# Altium footprint library SYNCBOX_TST.PcbLib: 267 footprints (part 9 of 17)
Each footprint in its own frame and in the unit in brackets; x right, y up, seen from the top. Pads: shape width x height; smd on the part's side, far side on the other; paste and mask are expansions set on the pad; w line width, h text height; cw(c..) or ccw(c..) is an arc to the next point about the centre after c.
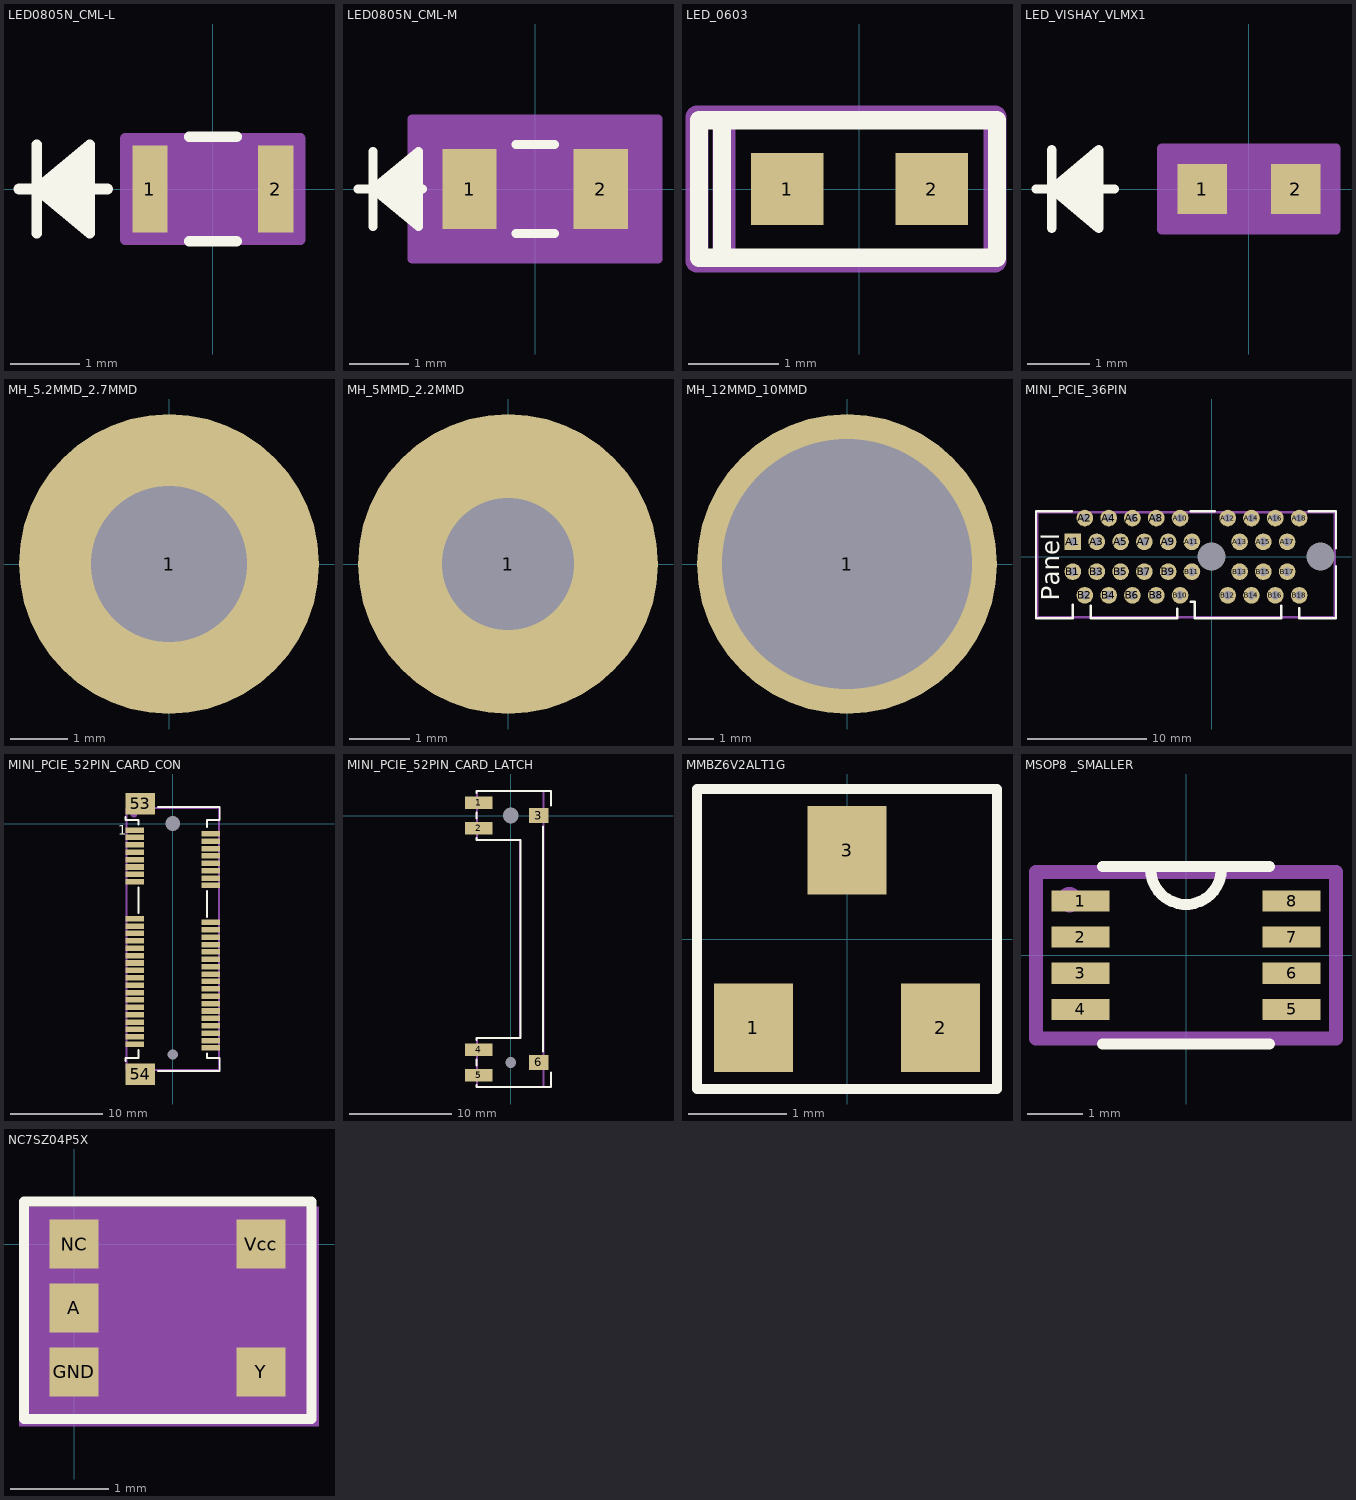
[diagram p8: the footprints below, top view; thin cyan lines are the x and y axes]

## LED0805N_CML-L [mil]
pads (2):
  rect 20x49 smd paste+0 mask+0: 1(-35.5,0) 2(35.5,0)
Top Overlay:
  lines w6: -109.5,0 -59.5,0 ; -99.5,-25 -99.5,25 ; -69.5,-20 -99.5,0 ; -69.5,-15 -99.5,0 ; -69.5,-10 -99.5,0 ; -69.5,-5 -99.5,0 ; -69.5,5 -99.5,0 ; -69.5,10 -99.5,0 ; -69.5,15 -99.5,0 ; -69.5,20 -99.5,0 ; -13.39,-29.5 13.39,-29.5 ; -13.39,29.5 13.39,29.5 ; -99.5,0 -69.5,-25 -69.5,25 -99.5,0
Mechanical 13:
  lines w1: -109.5,0 -59.5,0 ; -99.5,-25 -99.5,25 ; -69.5,-20 -99.5,0 ; -69.5,-15 -99.5,0 ; -69.5,-10 -99.5,0 ; -69.5,-5 -99.5,0 ; -69.5,5 -99.5,0 ; -69.5,10 -99.5,0 ; -69.5,15 -99.5,0 ; -69.5,20 -99.5,0 ; -99.5,0 -69.5,-25 -69.5,25 -99.5,0 ; -39.5,-24.5 -39.5,24.5 ; -39.5,-24.5 39.5,-24.5 ; -39.5,-24.5 -25.5,-24.5 -25.5,24.5 -39.5,24.5 ; -39.5,-24.5 -39.5,24.5 ; -39.5,24.5 39.5,24.5 ; 39.5,-24.5 39.5,24.5 ; 39.5,-24.5 39.5,24.5 ; 39.5,-24.5 25.5,-24.5 25.5,24.5 39.5,24.5
Mechanical 15:
  region: 49.5,-28.5 -49.5,-28.5 -49.5,28.5 49.5,28.5
  lines w6: -49.5,-28.5 49.5,-28.5 49.5,28.5 -49.5,28.5 -49.5,-28.5
3D body "LED0805N_CML-L.step": height 30.98, standoff 0, extent -39.48,-24.49 39.49,24.49
3D body: height 10, standoff 0, extent 0,0 10,10

## LED0805N_CML-M [mil]
pads (2):
  rect 36x53 smd paste+0 mask+0: 1(-43.5,0) 2(43.5,0)
Top Overlay:
  lines w6: -117.5,0 -74.6,0 ; -107.5,-25 -107.5,25 ; -77.5,-20 -107.5,0 ; -77.5,-15 -107.5,0 ; -77.5,-10 -107.5,0 ; -77.5,-5 -107.5,0 ; -77.5,5 -107.5,0 ; -77.5,10 -107.5,0 ; -77.5,15 -107.5,0 ; -77.5,20 -107.5,0 ; -12.75,-29.5 12.75,-29.5 ; -12.75,29.5 12.75,29.5 ; -107.5,0 -77.5,25 -77.5,-25 -107.5,0
Mechanical 13:
  lines w1: -117.5,0 -67.5,0 ; -107.5,-25 -107.5,25 ; -77.5,-20 -107.5,0 ; -77.5,-15 -107.5,0 ; -77.5,-10 -107.5,0 ; -77.5,-5 -107.5,0 ; -77.5,5 -107.5,0 ; -77.5,10 -107.5,0 ; -77.5,15 -107.5,0 ; -77.5,20 -107.5,0 ; -107.5,0 -77.5,25 -77.5,-25 -107.5,0 ; -39.5,-24.5 -39.5,24.5 ; -39.5,-24.5 -25.5,-24.5 -25.5,24.5 -39.5,24.5 ; -39.5,-24.5 39.5,-24.5 ; -39.5,-24.5 -39.5,24.5 ; -39.5,24.5 39.5,24.5 ; 39.5,-24.5 25.5,-24.5 25.5,24.5 39.5,24.5 ; 39.5,-24.5 39.5,24.5 ; 39.5,-24.5 39.5,24.5
Mechanical 15:
  region: 81.5,-46.5 -81.5,-46.5 -81.5,46.5 81.5,46.5
  lines w6: -81.5,-46.5 -81.5,46.5 81.5,46.5 81.5,-46.5 -81.5,-46.5
3D body "LED0805N_CML-M.step": height 30.98, standoff 0, extent -39.48,-24.49 39.49,24.49
3D body: height 10, standoff 0, extent 0,0 10,10

## LED_0603 [mm]
pads (2):
  rect 0.8x0.8 smd: 1(-0.8,0) 2(0.8,0)
Top Overlay:
  lines w0.2: -1.524,-0.762 -1.524,0.762 ; -1.778,-0.762 1.524,-0.762 1.524,0.762 -1.778,0.762 -1.778,-0.762
Mechanical 16:
  lines w0.254: -1.5,-0.8 -1.5,0.8 ; -1.8,-0.8 -1.8,0.8 1.5,0.8 1.5,-0.8 -1.8,-0.8
Mechanical 29:
  text ".Designator" at 0.4,0.3 h0.6
3D body "LED SMD 0603.step": height 0.65, standoff 0, extent -0.85,-0.4 0.85,0.4
3D body: height 0.66, standoff 0.5, extent -0.2,-0.2 0.2,0.2

## LED_VISHAY_VLMX1 [mil]
pads (2):
  rect 31.5x32 smd paste+0 mask+0: 1(-29.75,0) 2(29.75,0)
Top Overlay:
  lines w6: -135.5,0 -85.5,0 ; -125.5,-25 -125.5,25 ; -95.5,-20 -125.5,0 ; -95.5,-15 -125.5,0 ; -95.5,-10 -125.5,0 ; -95.5,-5 -125.5,0 ; -95.5,5 -125.5,0 ; -95.5,10 -125.5,0 ; -95.5,15 -125.5,0 ; -95.5,20 -125.5,0 ; -125.5,0 -95.5,25 -95.5,-25 -125.5,0
Mechanical 13:
  lines w1: -135.5,0 -85.5,0 ; -125.5,-25 -125.5,25 ; -95.5,-20 -125.5,0 ; -95.5,-15 -125.5,0 ; -95.5,-10 -125.5,0 ; -95.5,-5 -125.5,0 ; -95.5,5 -125.5,0 ; -95.5,10 -125.5,0 ; -95.5,15 -125.5,0 ; -95.5,20 -125.5,0 ; -125.5,0 -95.5,25 -95.5,-25 -125.5,0 ; -31.5,-16 31.5,-16 31.5,16 -31.5,16 -31.5,-16
Mechanical 15:
  region: -41.5,-26 -55.5,-26 -55.5,26 -41.5,26 41.5,26 55.5,26 55.5,-26 41.5,-26
  lines w6: -55.5,-26 -55.5,26 -41.5,26 41.5,26 55.5,26 55.5,-26 41.5,-26 -41.5,-26 -55.5,-26
3D body: height 10, standoff 0, extent 0,0 10,10
3D body "LED_VISHAY_VLMX1300.stp": height 32.01, standoff 0, extent -31.5,-15.98 31.5,15.98

## MH_5.2MMD_2.7MMD [mm]
pads (1):
  round 5.2 / inner round 3.683 / far side round 5.2 hole 2.7: 1(0,0)

## MH_5MMD_2.2MMD [mm]
pads (1):
  round 5 / inner round 3.683 / far side round 5 hole 2.2: 1(0,0)

## MH_7MMC_3.2MMD [mm]
via 0,0 diameter 7.2 hole 3.2

## MH_12MMC_10MMD [mm] "Mounting hole"
via 0,0 diameter 12 hole 10

## MH_12MMD_10MMD [mm]
pads (1):
  round 12 hole 10 mask+0.025: 1(0,0)

## MINI_PCIE_36PIN [mm]
pads (38):
  rrect70% 0x0 hole 2.35: 1(0,0) 2(9.15,0)
  rect 1.4x1.4 hole 0.7: A1(-11.65,1.25)
  round 1.4 hole 0.7: A2(-10.65,3.25) A3(-9.65,1.25) A4(-8.65,3.25) A5(-7.65,1.25) A6(-6.65,3.25) A7(-5.65,1.25) A8(-4.65,3.25) A9(-3.65,1.25) A10(-2.65,3.25) A11(-1.65,1.25) A12(1.35,3.25) A13(2.35,1.25) A14(3.35,3.25) A15(4.35,1.25) A16(5.35,3.25) A17(6.35,1.25) A18(7.35,3.25) B1(-11.65,-1.25) B2(-10.65,-3.25) B3(-9.65,-1.25) B4(-8.65,-3.25) B5(-7.65,-1.25) B6(-6.65,-3.25) B7(-5.65,-1.25) B8(-4.65,-3.25) B9(-3.65,-1.25) B10(-2.65,-3.25) B11(-1.65,-1.25) B12(1.35,-3.25) B13(2.35,-1.25) B14(3.35,-3.25) B15(4.35,-1.25) B16(5.35,-3.25) B17(6.35,-1.25) B18(7.35,-3.25)
Top Overlay:
  lines w0.2: -11.75,3.825 -14.75,3.825 -14.75,-5.175 -11.65,-5.175 -11.65,-4.025 ; -10.15,-4.125 -10.15,-5.175 -2.9,-5.175 -2.9,-4.375 ; -1.75,-3.775 -1.4,-3.775 -1.4,-5.175 5.85,-5.175 5.85,-4.125 ; -1.75,3.825 0.25,3.825 ; 7.35,-4.325 7.35,-5.175 10.45,-5.175 10.45,-0.8 ; 8.15,3.825 10.45,3.825 10.45,0.7
  text "Panel" at -12.8,-3.7 h1.5
Mechanical 16:
  lines w0.2: -14.65,-5.075 -14.65,3.725 10.35,3.725 10.35,-5.075 -14.65,-5.075
Mechanical 29:
  text ".Designator" at -0.5,0.3 h1.52
3D body "c-4-1612163-1-h-3d.stp": height 10, standoff -5.4, extent -14.65,-5.1 10.35,3.6

## MINI_PCIE_52PIN_CARD_CON [mm]
pads (56):
  rect 2x0.6 smd mask+0.05: 1(-4.1,-0.7) 2(4.1,-1.1) 3(-4.1,-1.5) 4(4.1,-1.9) 5(-4.1,-2.3) 6(4.1,-2.7) 7(-4.1,-3.1) 8(4.1,-3.5) 9(-4.1,-3.9) 10(4.1,-4.3) 11(-4.1,-4.7) 12(4.1,-5.1) 13(-4.1,-5.5) 14(4.1,-5.9) 15(-4.1,-6.3) 16(4.1,-6.7) 17(-4.1,-10.3) 18(4.1,-10.7) 19(-4.1,-11.1) 20(4.1,-11.5) 21(-4.1,-11.9) 22(4.1,-12.3) 23(-4.1,-12.7) 24(4.1,-13.1) 25(-4.1,-13.5) 26(4.1,-13.9) 27(-4.1,-14.3) 28(4.1,-14.7) 29(-4.1,-15.1) 30(4.1,-15.5) 31(-4.1,-15.9) 32(4.1,-16.3) 33(-4.1,-16.7) 34(4.1,-17.1) 35(-4.1,-17.5) 36(4.1,-17.9) 37(-4.1,-18.3) 38(4.1,-18.7) 39(-4.1,-19.1) 40(4.1,-19.5) 41(-4.1,-19.9) 42(4.1,-20.3) 43(-4.1,-20.7) 44(4.1,-21.1) 45(-4.1,-21.5) 46(4.1,-21.9) 47(-4.1,-22.3) 48(4.1,-22.7) 49(-4.1,-23.1) 50(4.1,-23.5) 51(-4.1,-23.9) 52(4.1,-24.3)
  rect 3.2x2.3 smd: 53(-3.5,2.15) 54(-3.5,-27.15)
  rrect70% 0x0 hole 1.6: 55(0,0)
  rrect70% 0x0 hole 1.1: 56(0,-25)
Top Overlay:
  lines w0.2: -5.1,-25.7 -5.1,-25.4 -3.7,-25.4 -3.7,-24.5 ; -5.1,0.7 -5.1,0.4 -3.7,0.4 -3.7,-0.1 ; -3.7,-9.7 -3.7,-6.9 ; -1.6,-26.8 5.1,-26.8 5.1,-25.4 3.7,-25.4 3.7,-24.9 ; -1.6,1.8 5.1,1.8 5.1,0.4 3.7,0.4 3.7,-0.4 ; 3.7,-10.1 3.7,-7.3
  text "1" at -5.9,-1.2 h1.02
Mechanical 16:
  circle w0.5: c-4.2,1 r0.1
  lines w0.2: -5,-26.7 5,-26.7 5,1.7 -5,1.7 -5,-26.7
Mechanical 29:
  text ".Designator" at -0.6,-10.9 h1.52
3D body "K3D-MM60-52B1-E1-R2 JAE Connector Division Proprietary.STEP": height 5.95, standoff -0.75, extent -5,-27.35 5,2.35

## MINI_PCIE_52PIN_CARD_LATCH [mm]
pads (8):
  rect 2.7x1.2 smd: 1(-3.15,1.25) 2(-3.15,-1.25) 4(-3.15,-22.95) 5(-3.15,-25.45)
  rect 1.9x1.5 smd: 3(2.75,0) 6(2.75,-24.2)
  rrect70% 0x0 hole 1.55: 7(0,0)
  rrect70% 0x0 hole 1.05: 8(0,-24.2)
Top Overlay:
  lines w0.2: -3.35,-26.4 -3.35,-26.6 3.95,-26.6 3.95,-25.2 ; -3.35,-24.5 -3.35,-23.9 ; -3.35,-22 -3.35,-21.8 0.95,-21.8 0.95,-2.4 -3.35,-2.4 -3.35,-2.2 ; -3.35,-0.3 -3.35,0.3 ; -3.35,2.2 -3.35,2.4 3.95,2.4 3.95,1 ; 3.15,-23.1 3.15,-1.1
Mechanical 16:
  lines w0.2: -3.3,-26.6 3.2,-26.6 3.2,2.4 -3.3,2.4 -3.3,-2.4 0.9,-2.4 0.9,-21.8 -3.3,-21.8 -3.3,-26.6
Mechanical 29:
  text ".Designator" at 1.5,-11.1 h1
3D body "K3D-MM60-EZH059-B5-R2 JAE Connector Division Proprietary.STEP": height 6.7, standoff -0.9, extent -3.95,-26.6 3.95,2.4

## MINI_PCIE_FULL CARD [mm]
3D body "PCI Express Mini Card (Full-Mini Card).step": height 6.9, standoff 2.15, extent 0,0 50.95,30

## MMBZ6V2ALT1G [mm]
pads (3):
  rect 0.8x0.9 smd: 1(-0.95,-0.9) 2(0.95,-0.9) 3(0,0.9)
Top Overlay:
  lines w0.1: -1.524,-1.524 1.524,-1.524 1.524,1.524 -1.524,1.524 -1.524,-1.524
3D body: height 0.89, standoff 0.01, extent -1.524,-0.889 1.524,0.889
3D body: height 0.3, standoff 0.01, extent -0.381,0.889 0.381,1.27
3D body: height 0.3, standoff 0.01, extent -1.27,-1.27 -0.635,-0.889
3D body: height 0.3, standoff 0.01, extent 0.635,-1.27 1.27,-0.889

## MSOP8 _SMALLER [mm]
pads (8):
  rect 1.04x0.38 smd mask+0.076: 1(-1.9,0.975) 2(-1.9,0.325) 3(-1.9,-0.325) 4(-1.9,-0.975) 5(1.9,-0.975) 6(1.9,-0.325) 7(1.9,0.325) 8(1.9,0.975)
Top Overlay:
  lines w0.2: -1.5,-1.6 1.5,-1.6 ; -1.5,1.6 1.5,1.6 ; -0.635,1.549 ccw(c0,1.549) 0.635,1.549
Mechanical 16:
  circle w0.254: c-2.1,1 r0.1
  lines w0.254: -2.7,-1.5 2.7,-1.5 2.7,1.5 -2.7,1.5 -2.7,-1.5
Mechanical 29:
  text ".Designator" at 1,0.4 h1
3D body: height 0.9, standoff 0, extent -1.5,-1.6 1.5,1.6

## NC7SZ04P5X [mm]
pads (5):
  rect 0.5x0.5 smd: A(0,-0.65) GND(0,-1.3) NC(0,0) Vcc(1.9,0) Y(1.9,-1.3)
Top Overlay:
  lines w0.1: -0.508,-1.778 2.413,-1.778 2.413,0.432 -0.508,0.432 -0.508,-1.778
Mechanical 15:
  rectangle: -0.559,-1.854 2.489,0.381
3D body: height 1.9, standoff 0.1, extent 0,-1.549 1.93,0.254
3D body: height 0.25, standoff 0, extent -0.127,-0.178 0,0.152
3D body: height 0.25, standoff 0, extent -0.127,-0.813 0,-0.457
3D body: height 0.25, standoff 0, extent -0.127,-1.448 0,-1.092
3D body: height 0.25, standoff 0, extent 1.93,-1.448 2.057,-1.118
3D body: height 0.25, standoff 0, extent 1.93,-0.178 2.083,0.127